# Altium footprint library Connectors.PcbLib: 10 footprints
Each footprint in its own frame and in the unit in brackets; x right, y up, seen from the top. Pads: shape width x height; smd on the part's side, far side on the other; paste and mask are expansions set on the pad; w line width, h text height; cw(c..) or ccw(c..) is an arc to the next point about the centre after c.
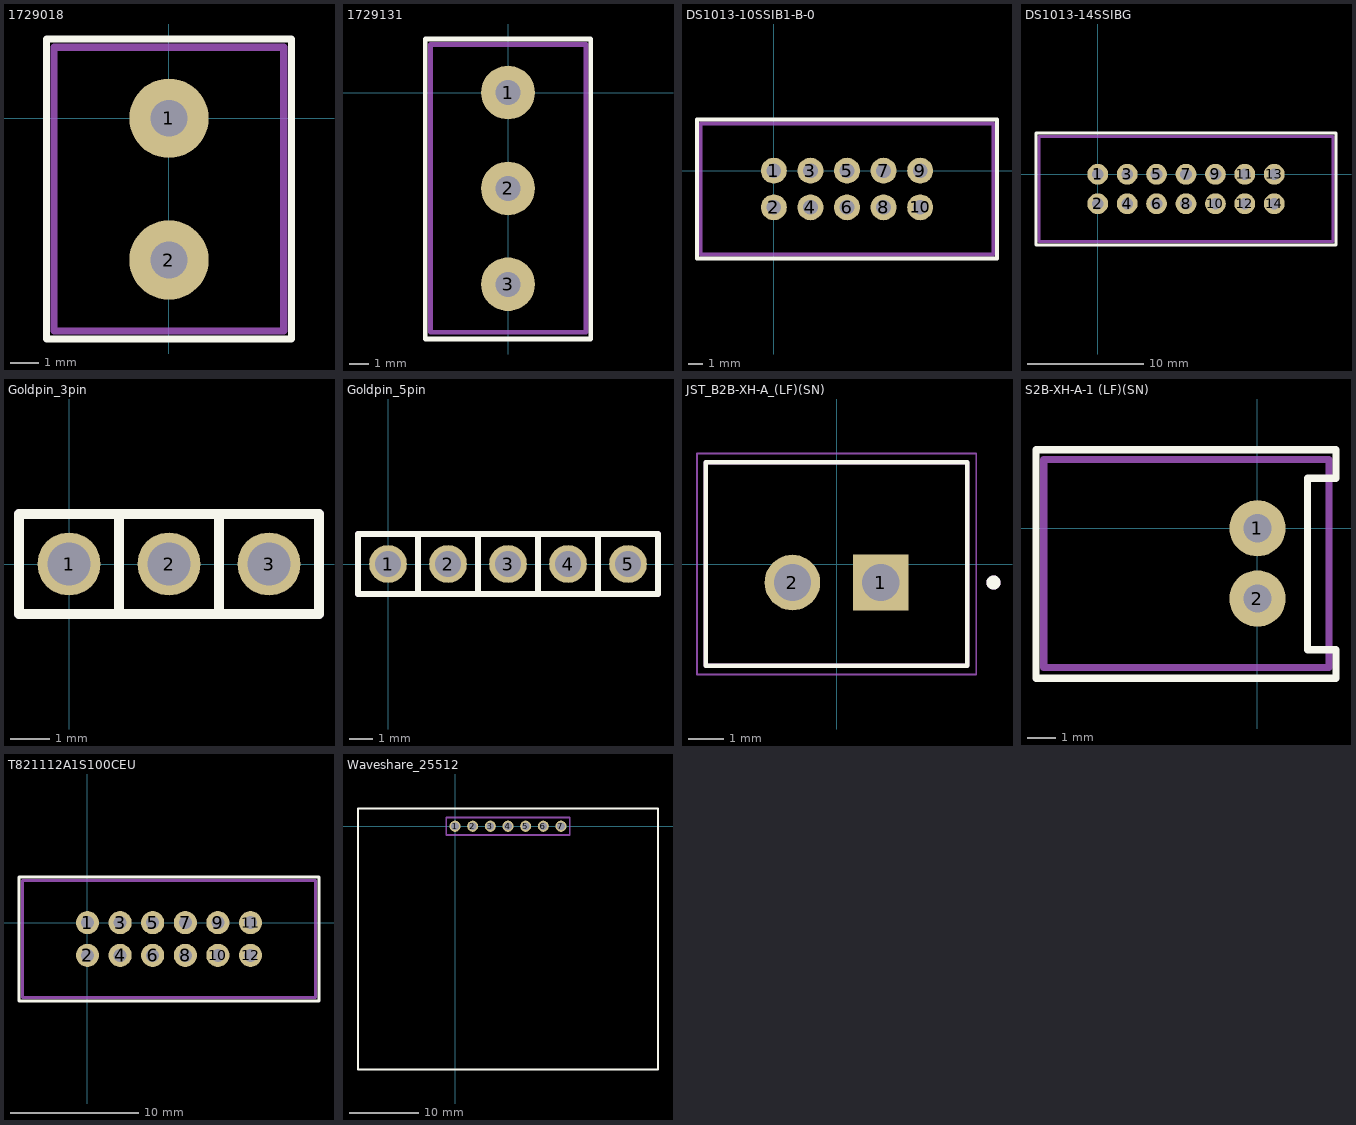
[diagram p0: the footprints below, top view; thin cyan lines are the x and y axes]

## 1729018 [mm] "Connector: PCB terminal block; 17.5A; 400V; PIN: 2; screw terminal"
height 10
pads (2):
  round 2.8 hole 1.3: 1(0,0) 2(0,-5)
Top Overlay:
  lines w0.254: -4.318,2.794 4.318,2.794 4.318,-7.782 ; -4.315,2.791 -4.315,-7.785 4.321,-7.785
  text ".DESIGNATOR" at -4.315,3.047 h1
Mechanical 1:
  lines w0.254: -4.05,-7.5 4.05,-7.5 4.05,2.5 -4.05,2.5 -4.05,-7.5

## 1729131 [mm] "Connector: PCB terminal block; 17.5A; 400V; PIN: 3; screw terminal"
height 10
pads (3):
  round 2.8 hole 1.3: 1(0,0) 2(0,-5) 3(0,-10)
Top Overlay:
  lines w0.254: -4.318,-12.854 -4.318,2.794 4.318,2.794 4.318,-12.854 -4.318,-12.854
  text ".DESIGNATOR" at -4.291,3.102 h1
Mechanical 1:
  lines w0.254: -4.05,-12.5 -4.05,2.5 4.064,2.5 4.064,-12.5 -4.05,-12.5

## DS1013-10SSIB1-B-0 [mm] "Connector: IDC; socket; male; PIN: 10; straight; THT; 2.54mm; 2x5"
height 8.8
pads (10):
  round 1.8 hole 1.02: 1(0,0) 2(0,-2.54) 3(2.54,0) 4(2.54,-2.54) 5(5.08,0) 6(5.08,-2.54) 7(7.62,0) 8(7.62,-2.54) 9(10.16,0) 10(10.16,-2.54)
Top Overlay:
  lines w0.254: -5.334,-6.096 15.494,-6.096 15.494,3.556 -5.334,3.556 -5.334,-6.096
  text ".DESIGNATOR" at -5.08,3.81 h1
Mechanical 1:
  lines w0.254: -5.07,-5.82 -5.07,3.28 15.23,3.28 15.23,-5.82 -5.07,-5.82
3D body "DS1013-10SSIB1-B-0--3DModel-STEP-510211.STEP": height 9.1, standoff -3.1, extent -5.07,-5.99 15.23,3.11

## DS1013-14SSIBG [mm] "Connector: IDC; socket; male; data; PIN: 14; straight; THT; 2.54mm"
pads (14):
  round 1.8 hole 1.02: 1(0,0) 2(0,-2.54) 3(2.54,0) 4(2.54,-2.54) 5(5.08,0) 6(5.08,-2.54) 7(7.62,0) 8(7.62,-2.54) 9(10.16,0) 10(10.16,-2.54) 11(12.7,0) 12(12.7,-2.54) 13(15.24,0) 14(15.24,-2.54)
Top Overlay:
  lines w0.254: -5.334,-6.096 20.574,-6.096 20.574,3.556 -5.334,3.556 -5.334,-6.096
  text ".DESIGNATOR" at -5.08,3.81 h1
Mechanical 1:
  lines w0.254: -5.07,-5.82 -5.07,3.28 20.32,3.28 20.32,-5.82 -5.07,-5.82
3D body "CVM_2-1761603-5.stp": height 9.2, standoff -2.61, extent -5.08,-5.715 20.32,3.505

## Goldpin_3pin [mm]
pads (3):
  round 1.6 hole 1.1: 1(0,0) 2(2.54,0) 3(5.08,0)
Top Overlay:
  lines w0.254: 1.27,-1.27 1.27,1.27 ; 3.81,-1.27 3.81,1.27 ; -1.27,-1.27 -1.27,1.27 6.35,1.27 6.35,-1.27 -1.27,-1.27
  text ".DESIGNATOR" at -1.267,1.523 h1
Mechanical 1:
  lines w0.254: -1.27,-1.27 -1.27,0 -1.27,1.27 6.35,1.27 6.35,-1.27 -1.27,-1.27

## Goldpin_5pin [mm]
pads (5):
  round 1.6 hole 1.1: 1(0,0) 2(2.54,0) 3(5.08,0) 4(7.62,0) 5(10.16,0)
Top Overlay:
  lines w0.254: 1.27,-1.27 1.27,1.27 ; 3.81,-1.27 3.81,1.27 ; 6.35,-1.27 6.35,1.27 ; 8.89,-1.27 8.89,1.27 ; -1.27,-1.27 -1.27,1.27 11.43,1.27 11.43,-1.27 -1.27,-1.27
  text ".DESIGNATOR" at -1.267,1.523 h1
Mechanical 1:
  lines w0.254: -1.27,-1.27 -1.27,0 -1.27,1.27 11.43,1.27 11.43,-1.27 -1.27,-1.27

## JST_B2B-XH-A_(LF)(SN) [mm] "Connector: wire-board; XH; socket; male; data; 3A; 250V; PIN: 2; 2.5mm"
height 7
pads (2):
  rect 1.575x1.575 hole 1.05: 1(1.25,-0.525)
  round 1.575 hole 1.05: 2(-1.25,-0.525)
Top Overlay:
  circle w0.2: c4.44,-0.525 r0.1
  lines w0.127: -3.7,-2.875 3.7,-2.875 3.7,2.875 -3.7,2.875 -3.7,-2.875
  text ".DESIGNATOR" at -3.81,3.302 h1
Mechanical 13:
  circle w0.2: c4.44,-0.525 r0.1
  lines w0.127: -3.7,-2.875 3.7,-2.875 3.7,2.875 -3.7,2.875 -3.7,-2.875
Mechanical 15:
  lines w0.05: -3.95,-3.125 -3.95,3.125 3.95,3.125 3.95,-3.125 -3.95,-3.125
3D body "step_temp.STEP": height 7, standoff -3.4, extent -3.7,-2.875 3.7,2.875

## S2B-XH-A-1 (LF)(SN) [mm] "Connector: wire-board; socket; male; PIN: 2; XH; 3A; 250V; angled 90°"
pads (2):
  round 2 hole 1: 1(0,0) 2(0,-2.5)
Top Overlay:
  lines w0.254: -7.874,-5.334 2.794,-5.334 2.794,-4.318 1.778,-4.318 1.778,1.778 2.794,1.778 2.794,2.794 -7.874,2.794 -7.874,-5.334
  text ".DESIGNATOR" at -7.834,3.07 h1
Mechanical 1:
  lines w0.254: -7.6,-4.95 -7.6,2.45 2.54,2.45 2.54,-4.95 -7.6,-4.95

## T821112A1S100CEU [mm] "Connector: IDC; socket; male; PIN: 12; straight; THT; 2.54mm; 2x6"
height 8.8
pads (12):
  round 1.8 hole 1.02: 1(0,0) 2(0,-2.54) 3(2.54,0) 4(2.54,-2.54) 5(5.08,0) 6(5.08,-2.54) 7(7.62,0) 8(7.62,-2.54) 9(10.16,0) 10(10.16,-2.54) 11(12.7,0) 12(12.7,-2.54)
Top Overlay:
  lines w0.254: -5.334,-6.096 -5.334,3.556 18.034,3.556 18.034,-6.096 -5.334,-6.096
  text ".DESIGNATOR" at -5.08,3.81 h1
Mechanical 1:
  lines w0.254: -5.07,-5.82 15.23,-5.82 17.77,-5.82 17.77,3.28 15.23,3.28 -5.07,3.28 -5.07,-5.82

## Waveshare_25512 [mm] "Waveshare 25512 placeholder"
pads (7):
  round 1.6 hole 1.1: 1(0,0) 2(2.54,0) 3(5.08,0) 4(7.62,0) 5(10.16,0) 6(12.7,0) 7(15.24,0)
Top Overlay:
  lines w0.254: -13.97,-35 29.21,-35 29.21,2.54 -13.97,2.54 -13.97,-35
Mechanical 1:
  lines w0.254: -1.27,-1.27 -1.27,1.27 16.51,1.27 16.51,-1.27 -1.27,-1.27